# Altium footprint library Dioneya.PcbLib: 2 footprints
Each footprint in its own frame and in the unit in brackets; x right, y up, seen from the top. Pads: shape width x height; smd on the part's side, far side on the other; paste and mask are expansions set on the pad; w line width, h text height; cw(c..) or ccw(c..) is an arc to the next point about the centre after c.
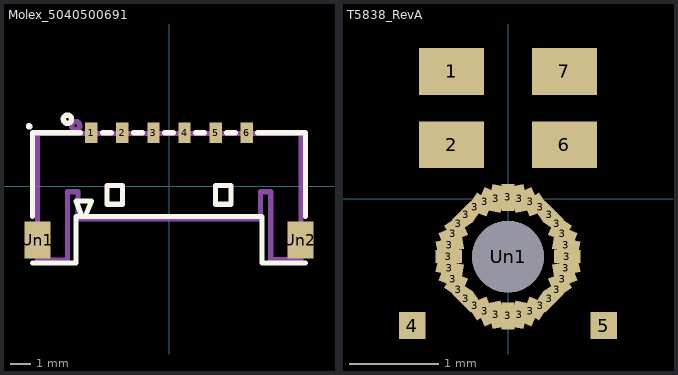
[diagram p0: the footprints below, top view; thin cyan lines are the x and y axes]

## Molex_5040500691 [mm]
pads (8):
  rect 0.6x1 smd: 1(-3.75,2.59) 2(-2.25,2.59) 3(-0.75,2.59) 4(0.75,2.59) 5(2.25,2.59) 6(3.75,2.59)
  rect 1.25x1.8 smd: Un1(-6.35,-2.59) Un2(6.35,-2.59)
F.SilkS:
  circle w0.254: c-6.76,2.9 r0.03
  circle w0.254: c-4.91,3.25 r0.2
  lines w0.254: -6.6,-3.7 -4.5,-3.7 -4.5,-1.45 4.5,-1.45 4.5,-3.7 6.6,-3.7 ; -6.6,-1.45 -6.6,2.59 -4.28,2.59 ; -4.2,-1.45 -4.5,-0.71 -3.75,-0.71 -4.05,-1.45 ; -3.22,2.59 -2.78,2.59 ; -1.72,2.59 -1.28,2.59 ; -0.22,2.59 0.22,2.59 ; 1.28,2.59 1.72,2.59 ; 2.78,2.59 3.22,2.59 ; 4.28,2.59 6.6,2.59 6.6,-1.45 ; -3,-0.86 -3,0.04 -2.25,0.04 -2.25,-0.86 -3,-0.86 ; 2.25,-0.86 2.25,0.04 3,0.04 3,-0.86 2.25,-0.86
F.Fab:
  text "'.Designator'" at -1.439,-0.398 h1
F.CrtYd:
  lines w0.254: -6.36,-3.56 -6.36,2.56 6.38,2.56 6.38,-3.54 4.92,-3.54 4.92,-0.26 4.42,-0.26 4.42,-1.56 -4.4,-1.56 -4.4,-0.26 -4.9,-0.26 -4.9,-3.54 -6.36,-3.56
Cmts.User:
  circle w0.254: c-4.51,2.94 r0.2

## T5838_RevA [mm]
pads (39):
  rect 0.725x0.522 smd: 1(-0.63,1.42) 2(-0.63,0.6) 6(0.63,0.6) 7(0.63,1.42)
  rect 0.3x0.146 smd: 3(-0.663,-0.65) 3(0.663,-0.65)
  rect 0.146x0.3 smd rot 78.75: 3(-0.65,-0.779) 3(0.65,-0.521)
  rect 0.146x0.3 smd rot 101.25: 3(-0.65,-0.521) 3(0.65,-0.779)
  rect 0.146x0.3 smd rot 67.5: 3(-0.612,-0.904) 3(0.612,-0.396)
  rect 0.146x0.3 smd rot 112.5: 3(-0.612,-0.396) 3(0.612,-0.904)
  rect 0.146x0.3 smd rot 56.25: 3(-0.551,-1.018) 3(0.551,-0.282)
  rect 0.146x0.3 smd rot 123.75: 3(-0.551,-0.282) 3(0.551,-1.018)
  rect 0.146x0.3 smd rot 45: 3(-0.468,-1.118) 3(0.468,-0.182)
  rect 0.146x0.3 smd rot 135: 3(-0.468,-0.182) 3(0.468,-1.118)
  rect 0.146x0.3 smd rot 33.75: 3(-0.368,-1.201) 3(0.368,-0.099)
  rect 0.146x0.3 smd rot 146.25: 3(-0.368,-0.099) 3(0.368,-1.201)
  rect 0.146x0.3 smd rot 22.5: 3(-0.254,-1.262) 3(0.254,-0.038)
  rect 0.146x0.3 smd rot 157.5: 3(-0.254,-0.038) 3(0.254,-1.262)
  rect 0.146x0.3 smd rot 11.25: 3(-0.129,-1.3) 3(0.129,0)
  rect 0.146x0.3 smd rot 168.75: 3(-0.129,0) 3(0.129,-1.3)
  rect 0.146x0.3 smd: 3(0,-1.312) 3(0,0.013)
  rect 0.3x0.3 smd: 4(-1.07,-1.42) 5(1.07,-1.42)
  round 0.8 hole 0.8: Un1(0,-0.65)